# Altium schematic symbol library SMD Slide Switch.SchLib: 1 symbol
Pins are listed as number, name and electrical type; pins without a type are passive.

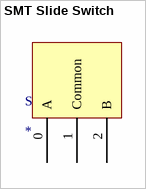
[diagram p0: symbol SMT Slide Switch]

## SMT Slide Switch
designator S
footprint PCBComponent_1
pins: 0 A, 1 Common, 2 B